# EAGLE library part ESP32-S3-DEVKITC-1 (library moto-core)
ESP32-S3-DEVKITC-1 Espressif ESP32-S3-DevKitC-1 (N16R8). J1 sol, J3 sag; USB'ler altta. Satirlar arasi 22.86 mm. Kart: 28.0 x 69.0 mm - Guven: H STEP: Espressif ESP32-S3-DevKitC-1 STEP (GrabCAD / espressif KiCad lib) NOT: Klon kartlarda genislik 25.5-28 mm arasi degisir, satir araligi (22.86) sabittir.
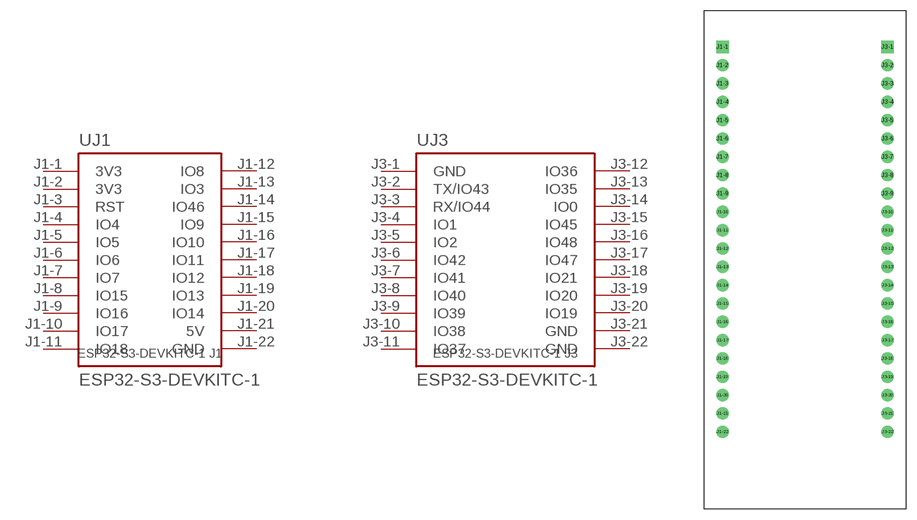
[diagram p1: symbol with the pads of ESP32-S3-DEVKITC-1; footprint ESP32-S3-DEVKITC-1]

Designator prefix U; gates J1=ESP32-S3-DEVKITC-1_J1 J3=ESP32-S3-DEVKITC-1_J3

## ESP32-S3-DEVKITC-1 (BOARD_SIZE: 28.0x69.0mm; CONFIDENCE: H)  [ESP32-S3-DEVKITC-1]
J1-1  J1:3V3  pas
J1-2  J1:3V3  pas
J1-3  J1:RST  pas
J1-4  J1:IO4  pas
J1-5  J1:IO5  pas
J1-6  J1:IO6  pas
J1-7  J1:IO7  pas
J1-8  J1:IO15  pas
J1-9  J1:IO16  pas
J1-10  J1:IO17  pas
J1-11  J1:IO18  pas
J1-12  J1:IO8  pas
J1-13  J1:IO3  pas
J1-14  J1:IO46  pas
J1-15  J1:IO9  pas
J1-16  J1:IO10  pas
J1-17  J1:IO11  pas
J1-18  J1:IO12  pas
J1-19  J1:IO13  pas
J1-20  J1:IO14  pas
J1-21  J1:5V  pas
J1-22  J1:GND  pas
J3-1  J3:GND  pas
J3-2  J3:TX/IO43  pas
J3-3  J3:RX/IO44  pas
J3-4  J3:IO1  pas
J3-5  J3:IO2  pas
J3-6  J3:IO42  pas
J3-7  J3:IO41  pas
J3-8  J3:IO40  pas
J3-9  J3:IO39  pas
J3-10  J3:IO38  pas
J3-11  J3:IO37  pas
J3-12  J3:IO36  pas
J3-13  J3:IO35  pas
J3-14  J3:IO0  pas
J3-15  J3:IO45  pas
J3-16  J3:IO48  pas
J3-17  J3:IO47  pas
J3-18  J3:IO21  pas
J3-19  J3:IO20  pas
J3-20  J3:IO19  pas
J3-21  J3:GND  pas
J3-22  J3:GND  pas

## Footprint ESP32-S3-DEVKITC-1 (pad centres in mm)
Espressif ESP32-S3-DevKitC-1 (N16R8). J1 sol, J3 sag; USB'ler altta. Satirlar arasi 22.86 mm. | Kart: 28.0 x 69.0 mm | Guven: H
drill 1 pad 1.7 square: J1-1 -11.43,29.5; J3-1 11.43,29.5
drill 1 pad 1.7 round: J1-2 -11.43,26.96; J1-3 -11.43,24.42; J1-4 -11.43,21.88; J1-5 -11.43,19.34; J1-6 -11.43,16.8; J1-7 -11.43,14.26; J1-8 -11.43,11.72; J1-9 -11.43,9.18; J1-10 -11.43,6.64; J1-11 -11.43,4.1; J1-12 -11.43,1.56; J1-13 -11.43,-0.98; J1-14 -11.43,-3.52; J1-15 -11.43,-6.06; J1-16 -11.43,-8.6; J1-17 -11.43,-11.14; J1-18 -11.43,-13.68; J1-19 -11.43,-16.22; J1-20 -11.43,-18.76; J1-21 -11.43,-21.3; J1-22 -11.43,-23.84; J3-2 11.43,26.96; J3-3 11.43,24.42; J3-4 11.43,21.88; J3-5 11.43,19.34; J3-6 11.43,16.8; J3-7 11.43,14.26; J3-8 11.43,11.72; J3-9 11.43,9.18; J3-10 11.43,6.64; J3-11 11.43,4.1; J3-12 11.43,1.56; J3-13 11.43,-0.98; J3-14 11.43,-3.52; J3-15 11.43,-6.06; J3-16 11.43,-8.6; J3-17 11.43,-11.14; J3-18 11.43,-13.68; J3-19 11.43,-16.22; J3-20 11.43,-18.76; J3-21 11.43,-21.3; J3-22 11.43,-23.84